# Altium schematic symbol library Sensor_IR.SchLib: 1 symbol
Pins are listed as number, name and electrical type; pins without a type are passive.

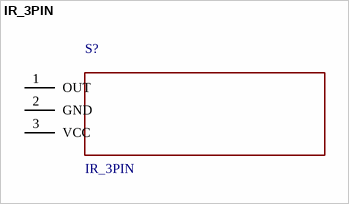
[diagram p0: symbol IR_3PIN]

## IR_3PIN
designator S?
IR_3PIN - simbolo de conexion sin huella; Carnet: 22993; Curso: Digital 2; Proyecto: proyecto 3; Tipo: Modulo externo; sin huella PCB; Pin numbering: Numeracion logica: verificar etiquetas del modulo; Author: Miguel Donis; Revision: 1.0
pins: 1 OUT, 2 GND, 3 VCC